# Altium footprint library L_YSPI1365_470M.PcbLib: 1 footprints
Each footprint in its own frame and in the unit in brackets; x right, y up, seen from the top. Pads: shape width x height; smd on the part's side, far side on the other; paste and mask are expansions set on the pad; w line width, h text height; cw(c..) or ccw(c..) is an arc to the next point about the centre after c.
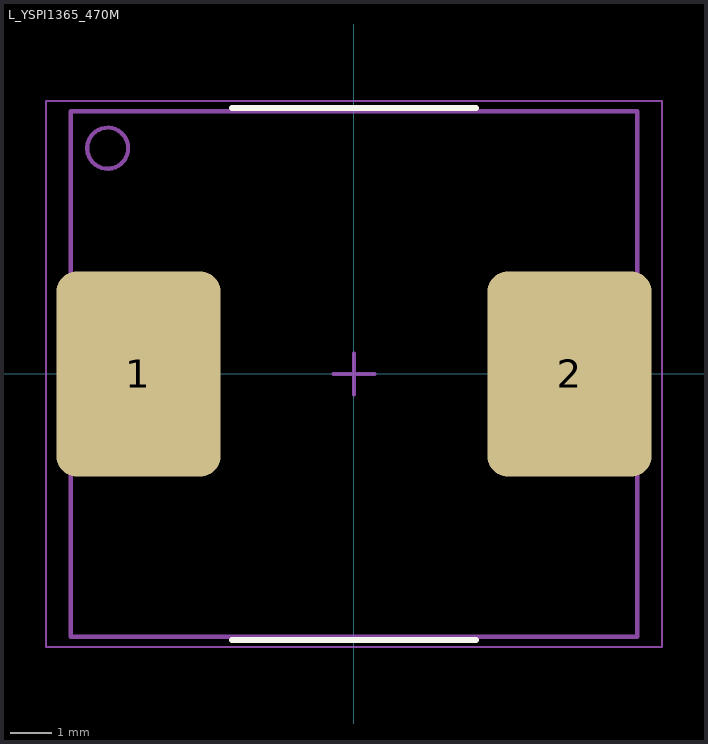
[diagram p0: the footprint, top view; thin cyan lines are the x and y axes]

## L_YSPI1365_470M [mm] "YJYCOIN YSPI1365-470M, 47uH, SMD Power Inductor, JLCPCB C497913"
height 6.5
pads (2):
  rrect25% 4x5 smd: 1(-5.25,0) 2(5.25,0)
Top Overlay:
  lines w0.15: -2.975,-6.475 2.975,-6.475 ; -2.975,6.475 2.975,6.475
Mechanical 13:
  circle w0.1: c-6,5.5 r0.5
  lines w0.1: -6.9,-6.4 -6.9,6.4 6.9,6.4 6.9,-6.4 -6.9,-6.4
Mechanical 15:
  lines w0.05: -7.5,-6.65 -7.5,6.65 7.5,6.65 7.5,-6.65 -7.5,-6.65
  lines w0.1: -0.5,0 0.5,0 ; 0,-0.5 0,0.5
3D body: height 6.5, standoff 0, extent -4.2,-6.4 4.2,6.4
3D body: height 6.5, standoff 0, extent -6.9,-6.4 -4.2,6.4
3D body: height 6.5, standoff 0, extent 4.2,-6.4 6.9,6.4